# Altium footprint library tactile_6_by_6_mm.PcbLib: 1 footprints
Each footprint in its own frame and in the unit in brackets; x right, y up, seen from the top. Pads: shape width x height; smd on the part's side, far side on the other; paste and mask are expansions set on the pad; w line width, h text height; cw(c..) or ccw(c..) is an arc to the next point about the centre after c.
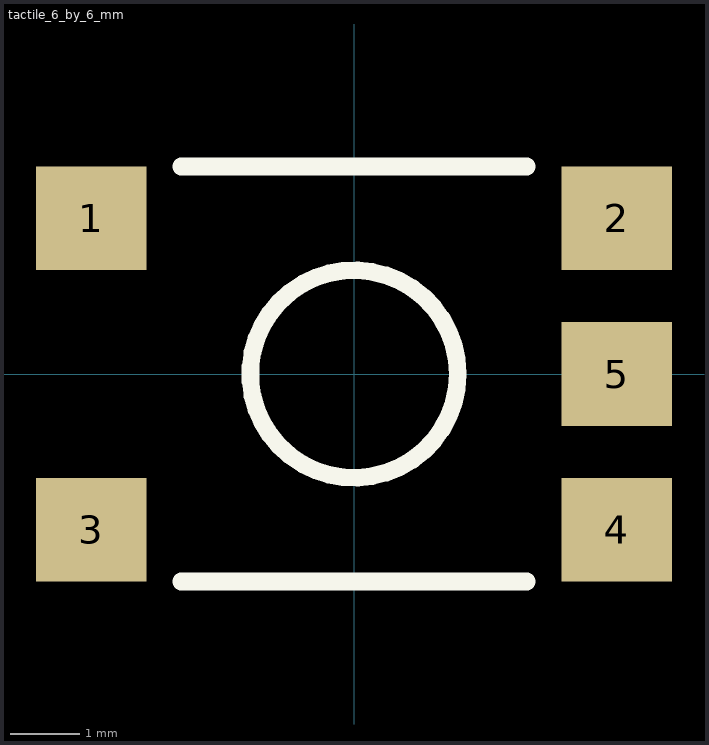
[diagram p0: the footprint, top view; thin cyan lines are the x and y axes]

## tactile_6_by_6_mm [mm]
pads (5):
  rect 1.6x1.5 smd: 1(-3.8,2.25) 2(3.8,2.25) 3(-3.8,-2.25) 4(3.8,-2.25) 5(3.8,0)
Top Overlay:
  circle w0.254: c0,0 r1.5
  lines w0.254: -2.5,-3 2.5,-3 ; -2.5,3 2.5,3